# Altium integrated library Res SMD 1210.IntLib: 1 symbol
Pins are listed as number, name and electrical type; pins without a type are passive.

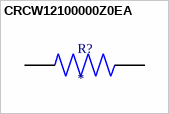
[diagram p0: symbol CRCW12100000Z0EA]

## CRCW12100000Z0EA
designator R?
Resistor;Thick Film;0 Ohms;0.5 W;0 Ohms Jumper;SMT;1210;TCR 0 ppm/DegC;TR | Vishay Dale CRCW12100000Z0EA; SnapEDA_Link: https://www.snapeda.com/parts/CRCW12100000Z0EA/Vishay+Dale/view-part/?ref=snap; Package: 3225 Vishay; Value: *; MF: Vishay Dale; MP: CRCW12100000Z0EA; Check_prices: https://www.snapeda.com/parts/CRCW12100000Z0EA/Vishay+Dale/view-part/?ref=eda
footprint RESC3225X60N
pins: 1, 2